# Altium schematic symbol library LM4041DYM3-1P2-TR.SchLib: 1 symbol
Pins are listed as number, name and electrical type; pins without a type are passive.

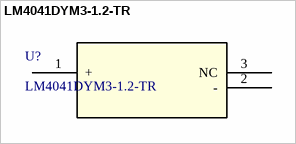
[diagram p0: symbol LM4041DYM3-1.2-TR]

## LM4041DYM3-1.2-TR
designator U?
No Description Available; Manufacturer_Name: Microchip; Copyright: Copyright (C) 2026 Ultra Librarian. All rights reserved.; Manufacturer_Part_Number: LM4041DYM3-1.2-TR; RefDes: RefDes; Type: Type
footprint SOT-23_MC_MCH
pins: 1 +, 2 -, 3 NC